# Altium schematic symbol library SKSLLAE010.SchLib: 1 symbol
Pins are listed as number, name and electrical type; pins without a type are passive.

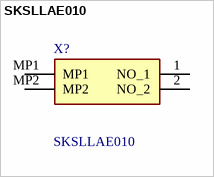
[diagram p0: symbol SKSLLAE010]

## SKSLLAE010
designator X?
Switch Tactile N.O. SPST Button Gull Wing 0.05A 12VDC 1.6N SMD Automotive T/R; Manufacturer_Name: ALPS Electric; Geometry.Height: 2.2mm; Mouser Part Number: 688-SKSLLAE010; Mouser Price/Stock: https://www.mouser.co.uk/ProductDetail/Alps-Alpine/SKSLLAE010?qs=9kmVzdp4bk0xNY%252Br3ZkAyw%3D%3D; Manufacturer_Part_Number: SKSLLAE010; Datasheet Link: https://tech.alpsalpine.com/prod/e/html/tact/surfacemount/sksl/sksllae010.html
footprint SKSLLAE010
pins: 1 NO_1, 2 NO_2, MP1, MP2